# Altium footprint library RP_Models.PcbLib: 14 footprints
Each footprint in its own frame and in the unit in brackets; x right, y up, seen from the top. Pads: shape width x height; smd on the part's side, far side on the other; paste and mask are expansions set on the pad; w line width, h text height; cw(c..) or ccw(c..) is an arc to the next point about the centre after c.
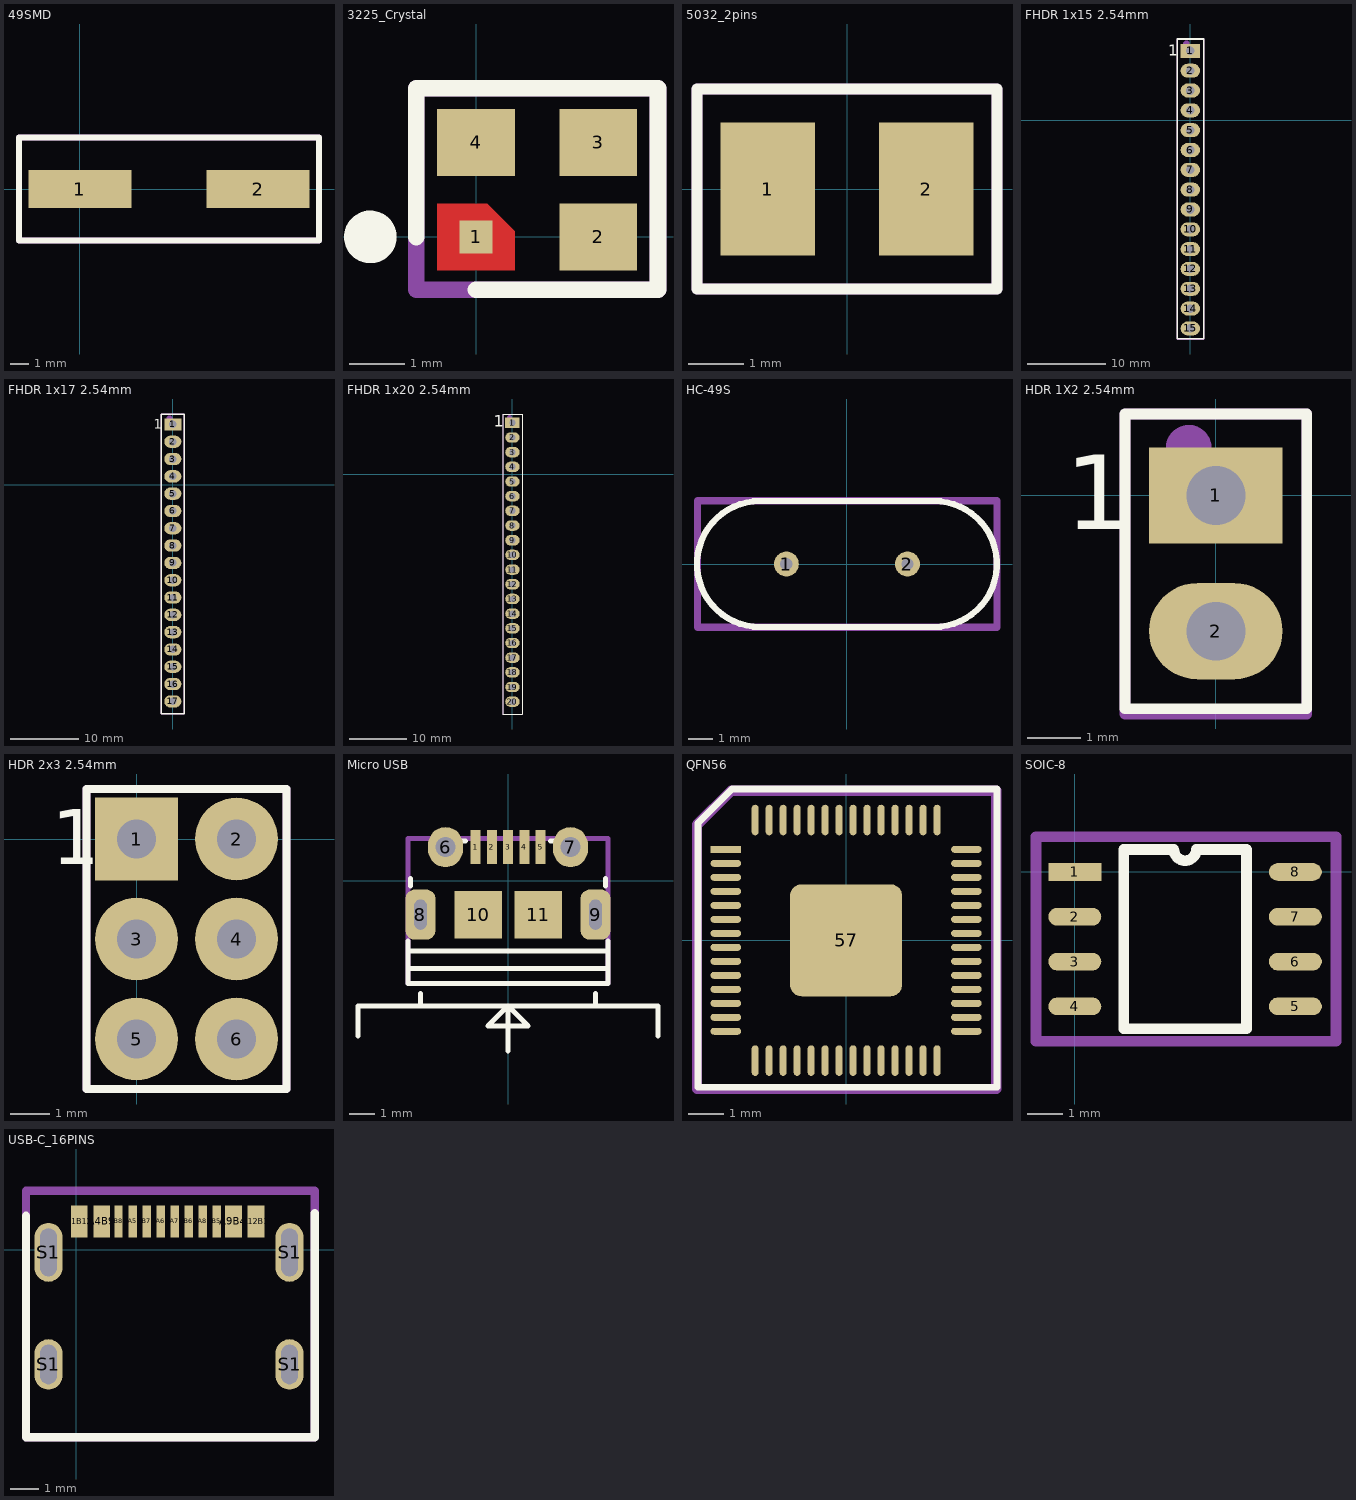
[diagram p0: the footprints below, top view; thin cyan lines are the x and y axes]

## 49SMD [mm]
pads (2):
  rect 5.5x2 smd: 1(0,0) 2(9.5,0)
Top Overlay:
  lines w0.3: -3.25,-2.75 -3.25,2.75 12.75,2.75 12.75,-2.75 12.5,-2.75 -3.25,-2.75
Mechanical 2:
  lines w0.3: -3.25,-2.75 12.5,-2.75 12.75,-2.75 12.75,2.75 -3.25,2.75 -3.25,-2.75
  text ".Designator" at -0.548,-0.966 h1
3D body "Crystal 49SMT H4,3mm.stp": height 4.3, standoff 0, extent -1.65,-2.415 11.15,2.415

## 3225_Crystal [mm]
pads (4):
  rect 0.6x0.6 smd paste+0 mask+0: 1(0,0)
  rect 1.4x1.2 smd: 2(2.2,0) 3(2.2,1.7) 4(0,1.7)
Top Layer:
  region: -0.7,0.6 -0.7,-0.6 0.7,-0.6 0.7,0.1 0.2,0.6
Top Overlay:
  circle w0.5: c-1.9,0 r0.224
  lines w0.3: -1.075,0 -1.075,2.675 3.275,2.675 3.275,-0.95 0,-0.95
Mechanical 2:
  lines w0.3: -1.075,-0.95 -1.075,2.675 3.275,2.675 3.275,-0.95 -1.075,-0.95
  text ".Designator" at -0.448,0.042 h1
3D body "3225 SMD Crystal Oscillator.STEP": height 0.71, standoff 0.01, extent -0.5,-0.4 2.7,2.1

## 5032_2pins [mm]
pads (2):
  rect 1.7x2.4 smd: 1(-1.425,0) 2(1.425,0)
Top Overlay:
  lines w0.2: -2.7,-1.8 2.7,-1.8 2.7,1.8 -2.7,1.8 -2.7,-1.8
Mechanical 2:
  lines w0.2: -2.7,-1.8 -2.7,1.8 2.7,1.8 2.7,-1.8 -2.7,-1.8
  text ".Desginator" at -7.397,-1.933 h1
3D body "5032_crystal_oscillator.step": height 0.8, standoff 0, extent -2.5,-1.6 2.5,1.6

## FHDR 1x15 2.54mm [mm]
pads (15):
  rect 2.5x1.8 hole 1.1: 1(0,8.89)
  oval 2.5x1.8 hole 1.1: 2(0,6.35) 3(0,3.81) 4(0,1.27) 5(0,-1.27) 6(0,-3.81) 7(0,-6.35) 8(0,-8.89) 9(0,-11.43) 10(0,-13.97) 11(0,-16.51) 12(0,-19.05) 13(0,-21.59) 14(0,-24.13) 15(0,-26.67)
Top Overlay:
  lines w0.2: -1.702,-27.975 -1.702,10.414 1.702,10.414 1.702,-27.975 -1.702,-27.975
  text "1" at -2.819,8.255 h1.4
Mechanical 2:
  circle w0.5: c-0.508,9.779 r0.18
  lines w0.2: -1.702,-28.025 -1.702,10.414 1.702,10.414 1.702,-28.025 -1.702,-28.025
  text ".Designator" at 0.508,-6.858 h1.52
3D body "User Library-Header_Fem_1X6.step": height 8.51, standoff -3.19, extent -1.23,-5.33 1.31,10.41
3D body "User Library-Header_Fem_1X6.step": height 8.51, standoff -3.19, extent -1.23,-20.57 1.31,-4.83
3D body "User Library-Header_Fem_1X6.step": height 8.51, standoff -3.19, extent -1.23,-28.19 1.31,-12.45

## FHDR 1x17 2.54mm [mm]
pads (17):
  rect 2.5x1.8 hole 1.1: 1(0,8.89)
  oval 2.5x1.8 hole 1.1: 2(0,6.35) 3(0,3.81) 4(0,1.27) 5(0,-1.27) 6(0,-3.81) 7(0,-6.35) 8(0,-8.89) 9(0,-11.43) 10(0,-13.97) 11(0,-16.51) 12(0,-19.05) 13(0,-21.59) 14(0,-24.13) 15(0,-26.67) 16(0,-29.21) 17(0,-31.75)
Top Overlay:
  lines w0.2: -1.702,-33.6 1.702,-33.6 1.702,10.414 -1.702,10.414 -1.702,-33.6
  text "1" at -2.819,8.255 h1.4
Mechanical 2:
  circle w0.5: c-0.508,9.779 r0.18
  lines w0.2: -1.702,-33.6 1.702,-33.6 1.702,10.414 -1.702,10.414 -1.702,-33.6
  text ".Designator" at 0.508,-6.858 h1.52
3D body "User Library-Header_Fem_1X6.step": height 8.51, standoff -3.19, extent -1.23,-20.57 1.31,-4.83
3D body "User Library-Header_Fem_1X6.step": height 8.51, standoff -3.19, extent -1.23,-28.19 1.31,-12.45
3D body "User Library-Header_Fem_1X6.step": height 8.51, standoff -3.19, extent -1.23,-5.33 1.31,10.41
3D body "User Library-Header_Fem_1X6.step": height 8.51, standoff -3.19, extent -1.31,-33.27 1.23,-17.53

## FHDR 1x20 2.54mm [mm]
pads (20):
  rect 2.5x1.8 hole 1.1: 1(0,8.89)
  oval 2.5x1.8 hole 1.1: 2(0,6.35) 3(0,3.81) 4(0,1.27) 5(0,-1.27) 6(0,-3.81) 7(0,-6.35) 8(0,-8.89) 9(0,-11.43) 10(0,-13.97) 11(0,-16.51) 12(0,-19.05) 13(0,-21.59) 14(0,-24.13) 15(0,-26.67) 16(0,-29.21) 17(0,-31.75) 18(0,-34.29) 19(0,-36.83) 20(0,-39.37)
Top Overlay:
  lines w0.2: -1.702,-41.5 1.702,-41.5 1.702,10.414 -1.702,10.414 -1.702,-41.5
  text "1" at -3.25,8.25 h2
Mechanical 2:
  circle w0.5: c-0.508,9.779 r0.18
  lines w0.2: -1.702,-41.5 1.702,-41.5 1.702,10.414 -1.702,10.414 -1.702,-41.5
  text ".Designator" at 0.508,-6.858 h1.52
3D body "User Library-Header_Fem_1X6.step": height 8.51, standoff -3.19, extent -1.31,-33.27 1.23,-17.53
3D body "User Library-Header_Fem_1X6.step": height 8.51, standoff -3.19, extent -1.23,-28.19 1.31,-12.45
3D body "User Library-Header_Fem_1X6.step": height 8.51, standoff -3.19, extent -1.23,-20.57 1.31,-4.83
3D body "User Library-Header_Fem_1X6.step": height 8.51, standoff -3.19, extent -1.23,-5.33 1.31,10.41
3D body "User Library-Header_Fem_1X6.step": height 8.51, standoff -3.19, extent -1.31,-40.89 1.23,-25.15

## HC-49S [mm]
pads (2):
  round 1 hole 0.5: 1(-2.44,0) 2(2.44,0)
Top Overlay:
  lines w0.254: -3.505,-2.54 cw(c-3.505,0) -3.505,2.54 3.505,2.54 cw(c3.505,0) 3.505,-2.54 -3.505,-2.54
Mechanical 2:
  lines w0.3: -6.025,-2.55 -6.025,2.55 6.05,2.55 6.05,-2.55 -6.025,-2.55
  text ".Designator" at -8.17,-2.549 h2.29
3D body "crystal_hc49.STEP": height 3.61, standoff -4.99, extent -5.675,-2.325 5.675,2.325

## HDR 1X2 2.54mm [mm]
pads (2):
  rect 2.5x1.8 hole 1.1: 1(0,0)
  oval 2.5x1.8 hole 1.1: 2(0,-2.54)
Top Overlay:
  lines w0.2: -1.702,-3.99 -1.702,1.524 1.702,1.524 1.702,-3.99 -1.702,-3.99
  text "1" at -2.819,-0.635 h1.4
Mechanical 2:
  circle w0.5: c-0.508,0.889 r0.18
  lines w0.2: -1.702,-4.09 -1.702,1.524 1.702,1.524 1.702,-4.09 -1.702,-4.09
  text ".Designator" at 0.55,-3.69 h1.52
3D body "HeaderPin Male 1x2x2.54.STEP": height 8.89, standoff -3.05, extent -1.3,-3.805 1.24,1.275

## HDR 2x3 2.54mm [mm]
pads (6):
  rect 2.1x2.1 hole 1: 1(0,0)
  round 2.1 hole 1: 2(2.54,0) 3(0,-2.54) 4(2.54,-2.54) 5(0,-5.08) 6(2.54,-5.08)
Top Overlay:
  lines w0.2: -1.27,-6.35 3.81,-6.35 3.81,1.27 -1.27,1.27 -1.27,-6.35
  text "1" at -2.159,-0.635 h1.4
Mechanical 2:
  circle w0.5: c-0.508,0.508 r0.18
  lines w0.2: -1.27,-6.35 3.81,-6.35 3.81,1.27 -1.27,1.27 -1.27,-6.35
  text ".Designator" at 1.778,-3.81 h1
3D body "TSW-102-23-T-T.stp": height 8.39, standoff -2.91, extent -1.27,-6.35 3.81,1.27

## Micro USB [mm]
pads (11):
  rect 0.4x1.35 smd mask+0.05: 1(-1.3,1.35) 2(-0.65,1.35) 3(0,1.35) 4(0.65,1.35) 5(1.3,1.35)
  oval 1.4x1.6 hole 0.8: 6(-2.5,1.35) 7(2.5,1.35)
  rrect60% 1.2x2 hole 0.5 slot 1.2 at 90 deg: 8(-3.5,-1.35) 9(3.5,-1.35)
  rect 1.9x1.9 smd: 10(-1.2,-1.35) 11(1.2,-1.35)
Top Overlay:
  lines w0.2: -6,-6.2 -6,-5 6,-5 6,-6.2 ; -4,-3.5 4,-3.5 ; -4,-2.8 4,-2.8 ; -4,-2.4 -4,-4.1 4,-4.1 4,-2.4 ; -3.9,-0.2 -3.9,0.1 ; -3.5,-5 -3.5,-4.5 ; -2.1,1.6 -1.7,1.6 ; 0,-6.8 0,-5 ; 1.7,1.6 2.1,1.6 ; 3.5,-5 3.5,-4.5 ; 3.9,-0.2 3.9,0.1 ; 0,-5 0.8,-5.8 -0.8,-5.8 0,-5
Mechanical 2:
  lines w0.2: -4,-4.1 4,-4.1 4,1.7 -4,1.7 -4,-4.1
  text ".Designator" at -1.6,-1.2 h2
3D body "10118193-0001lfc.stp": height 2.87, standoff -0.73, extent -3.928,-4.061 3.928,1.6

## QFN56 [mm]
pads (57):
  rect 0.875x0.2 smd mask+0.102: 1(-3.437,2.6)
  oval 0.875x0.2 smd mask+0.102: 2(-3.437,2.2) 3(-3.437,1.8) 4(-3.437,1.4) 5(-3.437,1) 6(-3.437,0.6) 7(-3.437,0.2) 8(-3.437,-0.2) 9(-3.437,-0.6) 10(-3.437,-1) 11(-3.437,-1.4) 12(-3.437,-1.8) 13(-3.437,-2.2) 14(-3.437,-2.6) 29(3.437,-2.6) 30(3.437,-2.2) 31(3.437,-1.8) 32(3.437,-1.4) 33(3.437,-1) 34(3.437,-0.6) 35(3.437,-0.2) 36(3.437,0.2) 37(3.437,0.6) 38(3.437,1) 39(3.437,1.4) 40(3.437,1.8) 41(3.437,2.2) 42(3.437,2.6)
  oval 0.2x0.875 smd mask+0.102: 15(-2.6,-3.437) 16(-2.2,-3.437) 17(-1.8,-3.437) 18(-1.4,-3.437) 19(-1,-3.437) 20(-0.6,-3.437) 21(-0.2,-3.437) 22(0.2,-3.437) 23(0.6,-3.437) 24(1,-3.437) 25(1.4,-3.437) 26(1.8,-3.437) 27(2.2,-3.437) 28(2.6,-3.437) 43(2.6,3.437) 44(2.2,3.437) 45(1.8,3.437) 46(1.4,3.437) 47(1,3.437) 48(0.6,3.437) 49(0.2,3.437) 50(-0.2,3.437) 51(-0.6,3.437) 52(-1,3.437) 53(-1.4,3.437) 54(-1.8,3.437) 55(-2.2,3.437) 56(-2.6,3.437)
  rrect20% 3.2x3.2 smd: 57(0,0)
Top Overlay:
  lines w0.2: -4.237,-4.2 -4.237,3.35 -3.262,4.325 4.313,4.325 4.313,-4.2 -4.237,-4.2
Bottom Overlay:
  lines w0.2: -4.237,-4.2 4.313,-4.2 4.313,4.325 -3.262,4.325 -4.237,3.35 -4.237,-4.2
Mechanical 2:
  lines w0.3: -4.262,-4.25 -4.262,3.3 -3.287,4.275 4.288,4.275 4.288,-4.25 -4.262,-4.25
  text ".Designator" at -2.286,-0.683 h1
3D body "User Library-QFN56_0_4.step": height 0.9, standoff 0, extent -3.492,-3.505 3.518,3.505

## SOIC-8 [mm]
pads (8):
  rect 1.5x0.5 smd: 1(0,0)
  oval 1.5x0.5 smd: 2(0,-1.27) 3(0,-2.54) 4(0,-3.81) 5(6.25,-3.81) 6(6.25,-2.54) 7(6.25,-1.27) 8(6.25,0)
Top Overlay:
  lines w0.3: 1.385,-4.445 1.385,0.635 2.807,0.635 ccw(c3.125,0.635) 3.442,0.635 4.865,0.635 4.865,-4.445 1.385,-4.445
Mechanical 2:
  lines w0.3: -1.1,-4.8 7.4,-4.8 7.4,1 -1.1,1 -1.1,0 -1.1,-4.8
  text ".Designator" at 0.102,-2.433 h1
3D body "bd6210f-e2.stp": height 1.62, standoff 0.01, extent -0.075,-4.425 6.125,0.575

## USB-C [mm]

## USB-C_16PINS [mm]
pads (16):
  rect 0.6x1.15 smd: A1B12(0.1,1) A4B9(0.9,1) A9B4(5.6,1) A12B1(6.4,1)
  rect 0.3x1.15 smd: A5(2,1) A6(3,1) A7(3.5,1) A8(4.5,1) B5(5,1) B6(4,1) B7(2.5,1) B8(1.5,1)
  oval 1x1.8 hole 0.6 slot 1.4 at 90 deg: S1(-1,-4.1) S1(7.6,-4.1)
  oval 1x2.1 hole 0.6 slot 1.7 at 90 deg: S1(-1,-0.1) S1(7.6,-0.1)
Top Overlay:
  lines w0.3: -1.8,1.2 -1.8,-6.7 8.5,-6.7 8.5,1.3
Mechanical 15:
  lines w0.3: -1.8,-6.7 8.5,-6.7 8.5,2.1 -1.8,2.1 -1.8,-6.7
  text ".Designator" at 0.002,-2.9 h1.5
3D body "USB Type C Port (SMD Type).STEP": height 3.22, standoff -0.98, extent -1.225,-6.825 7.715,1.075